# Altium footprint library ESP32S3DevKitC1N32R16V.PcbLib: 1 footprints
Each footprint in its own frame and in the unit in brackets; x right, y up, seen from the top. Pads: shape width x height; smd on the part's side, far side on the other; paste and mask are expansions set on the pad; w line width, h text height; cw(c..) or ccw(c..) is an arc to the next point about the centre after c.
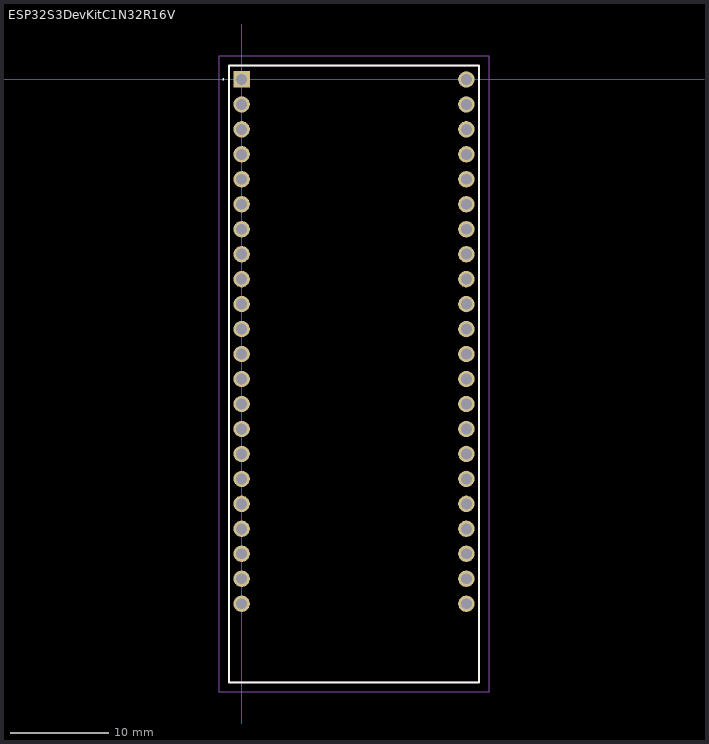
[diagram p0: the footprint, top view; thin cyan lines are the x and y axes]

## ESP32S3DevKitC1N32R16V [mm]
pads (44):
  rect 1.665x1.665 hole 1.11: J111(0,0)
  round 1.665 hole 1.11: J112(0,-2.54) J113(0,-5.08) J114(0,-7.62) J115(0,-10.16) J116(0,-12.7) J117(0,-15.24) J118(0,-17.78) J119(0,-20.32) J120(0,-22.86) J121(0,-25.4) J122(0,-27.94) J123(0,-30.48) J124(0,-33.02) J125(0,-35.56) J126(0,-38.1) J127(0,-40.64) J128(0,-43.18) J129(0,-45.72) J130(0,-48.26) J131(0,-50.8) J132(0,-53.34) J311(22.86,0) J312(22.86,-2.54) J313(22.86,-5.08) J314(22.86,-7.62) J315(22.86,-10.16) J316(22.86,-12.7) J317(22.86,-15.24) J318(22.86,-17.78) J319(22.86,-20.32) J320(22.86,-22.86) J321(22.86,-25.4) J322(22.86,-27.94) J323(22.86,-30.48) J324(22.86,-33.02) J325(22.86,-35.56) J326(22.86,-38.1) J327(22.86,-40.64) J328(22.86,-43.18) J329(22.86,-45.72) J330(22.86,-48.26) J331(22.86,-50.8) J332(22.86,-53.34)
Top Overlay:
  lines w0.1: -1.9,0 cw(c-1.85,0) -1.8,0 ; -1.9,0 -1.9,0 ; -1.9,0 ccw(c-1.85,0) -1.8,0 ; -1.8,0 -1.8,0
  lines w0.2: -1.27,-61.34 24.13,-61.34 24.13,1.4 -1.27,1.4 -1.27,-61.34
Mechanical 15:
  lines w0.1: -1.27,-61.34 24.13,-61.34 24.13,1.4 -1.27,1.4 -1.27,-61.34
Mechanical 20:
  lines w0.1: -2.27,-62.34 25.13,-62.34 25.13,2.4 -2.27,2.4 -2.27,-62.34